# Altium footprint library Sensor.PcbLib: 9 footprints
Each footprint in its own frame and in the unit in brackets; x right, y up, seen from the top. Pads: shape width x height; smd on the part's side, far side on the other; paste and mask are expansions set on the pad; w line width, h text height; cw(c..) or ccw(c..) is an arc to the next point about the centre after c.
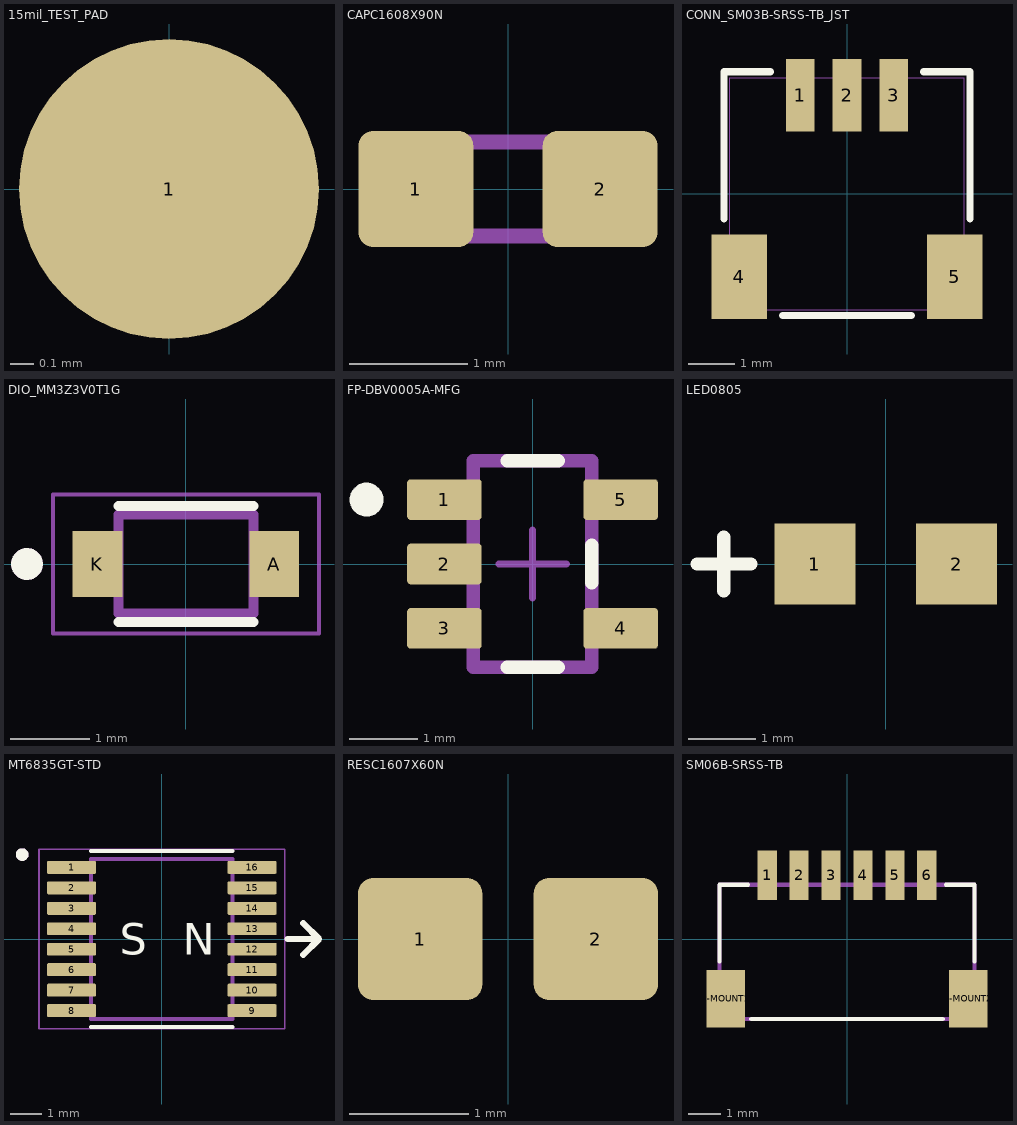
[diagram p0: the footprints below, top view; thin cyan lines are the x and y axes]

## 15mil_TEST_PAD [mm]
pads (1):
  round 1.27 smd paste-2539.97 mask+0.051: 1(0,0)

## CAPC1608X90N [mm]
pads (2):
  rrect25% 0.972x0.981 smd mask+0.051: 1(-0.78,0) 2(0.78,0)
Top 3D Body:
  lines w0.127: -0.8,-0.4 0.8,-0.4 0.8,0.4 -0.8,0.4 -0.8,-0.4
3D body "step_temp.STEP": height 0.9, standoff 0, extent -0.8,-0.4 0.8,0.4

## CONN_SM03B-SRSS-TB_JST [mil]
pads (5):
  rect 24x61 smd paste+0 mask+2: 1(-39.37,82.68) 2(0,82.68) 3(39.37,82.68)
  rect 47x71 smd paste-35.5 mask+4: 4(-90.55,-69.88) 5(90.55,-69.88)
Top Overlay:
  lines w6: -103.43,-21.28 -103.43,102.44 -64.47,102.44 ; -53.95,-102.44 53.95,-102.44 ; 64.47,102.44 103.43,102.44 103.43,-21.28
Top 3D Body:
  lines w1: -98.43,-97.44 98.43,-97.44 98.43,97.44 -98.43,97.44 -98.43,-97.44
3D body "SM03B-SRSS-TB(LF)(SN)--3DModel-STEP-56544.STEP": height 116.15, standoff -0.39, extent -98.43,-97.24 98.43,97.64

## DIO_MM3Z3V0T1G [mm]
pads (2):
  rect 0.625x0.83 smd: A(1.112,0) K(-1.112,0)
Top Overlay:
  circle w0.2: c-2,0 r0.1
  lines w0.127: -0.85,-0.728 0.85,-0.728 ; -0.85,0.728 0.85,0.728
Mechanical 13:
  circle w0.2: c-2,0 r0.1
  lines w0.127: -0.85,-0.625 -0.85,0.625 0.85,0.625 0.85,-0.625 -0.85,-0.625
Mechanical 15:
  lines w0.05: -1.675,-0.875 -1.675,0.875 1.675,0.875 1.675,-0.875 -1.675,-0.875
3D body "step_temp.STEP": height 1, standoff 0, extent -1.25,-0.619 1.25,0.619

## FP-DBV0005A-MFG [mm]
height 8.54
pads (5):
  rrect17% 1.1x0.6 smd paste+0 mask+0: 1(-1.3,0.95) 2(-1.3,0) 3(-1.3,-0.95) 4(1.3,-0.95) 5(1.3,0.95)
Top Overlay:
  circle w0.25: c-2.45,0.95 r0.125
  lines w0.2: -0.375,-1.525 0.375,-1.525 ; -0.375,1.525 0.375,1.525 ; 0.875,-0.275 0.875,0.275
Top 3D Body:
  lines w0.2: -0.875,-1.525 -0.875,1.525 0.875,1.525 0.875,-1.525 -0.875,-1.525
Top Component Center:
  lines w0.1: -0.5,0 0.5,0 ; 0,-0.5 0,0.5
3D body "IC_Texas_Instruments_SN65LVDT2DBVT_eec.STEP": height 0.25, standoff 0, extent -1.95,-1.775 1.95,1.775

## LED0805 [mm]
pads (2):
  rect 1.2x1.2 smd: 1(-1.05,0) 2(1.05,0)
Top Overlay:
  lines w0.2: -2.8,0 -2,0 ; -2.4,-0.4 -2.4,0.4
3D body: height 0.8, standoff 0, extent -1,-0.65 1,0.65

## MT6835GT-STD [mm]
pads (16):
  rrect25% 1.57x0.41 smd mask+0.152: 1(-2.87,2.275) 2(-2.87,1.625) 3(-2.87,0.975) 4(-2.87,0.325) 5(-2.87,-0.325) 6(-2.87,-0.975) 7(-2.87,-1.625) 8(-2.87,-2.275) 9(2.87,-2.275) 10(2.87,-1.625) 11(2.87,-0.975) 12(2.87,-0.325) 13(2.87,0.325) 14(2.87,0.975) 15(2.87,1.625) 16(2.87,2.275)
Top Overlay:
  circle w0.2: c-4.44,2.685 r0.1
  lines w0.127: -2.25,-2.8 2.25,-2.8 ; -2.25,2.8 2.25,2.8
  lines w0.2: 4,0 5,0 ; 4.5,-0.5 5,0 ; 4.5,0.5 5,0
  text "S" at -1.333,-0.5 h1
  text "N" at 0.667,-0.5 h1
Mechanical 13:
  circle w0.2: c-4.44,2.685 r0.1
  lines w0.127: -2.25,-2.55 -2.25,2.55 2.25,2.55 2.25,-2.55 -2.25,-2.55
Mechanical 15:
  lines w0.05: -3.905,-2.85 -3.905,2.85 3.905,2.85 3.905,-2.85 -3.905,-2.85
3D body "TSSOP-16 0.65p 4.4mm.step": height 1, standoff 0, extent -3.15,-2.5 3.15,2.5

## RESC1607X60N [mm]
pads (2):
  rrect25% 1.04x1.02 smd mask+0.051: 1(-0.735,0) 2(0.735,0)
3D body "step_temp.STEP": height 0.55, standoff 0, extent -0.8,-0.4 0.8,0.4

## SM06B-SRSS-TB [mm]
pads (8):
  rect 0.6x1.55 smd mask+0.051: 1(-2.5,2) 2(-1.5,2) 3(-0.5,2) 4(0.5,2) 5(1.5,2) 6(2.5,2)
  rect 1.2x1.8 smd: P-MOUNT1(-3.8,-1.875) P-MOUNT2(3.8,-1.875)
Top Overlay:
  lines w0.127: -4,-0.7 -4,1.7 -3.1,1.7 ; -3,-2.5 3,-2.5 ; 3.1,1.7 4,1.7 4,-0.7
Top 3D Body:
  lines w0.127: -4,-2.5 4,-2.5 4,1.7 -4,1.7 -4,-2.5
3D body "step_temp.STEP": height 2.95, standoff 0, extent -4,-2.634 4,2.316